# Altium schematic symbol library Diode.SchLib: 78 symbols
Pins are listed as number, name and electrical type; pins without a type are passive.

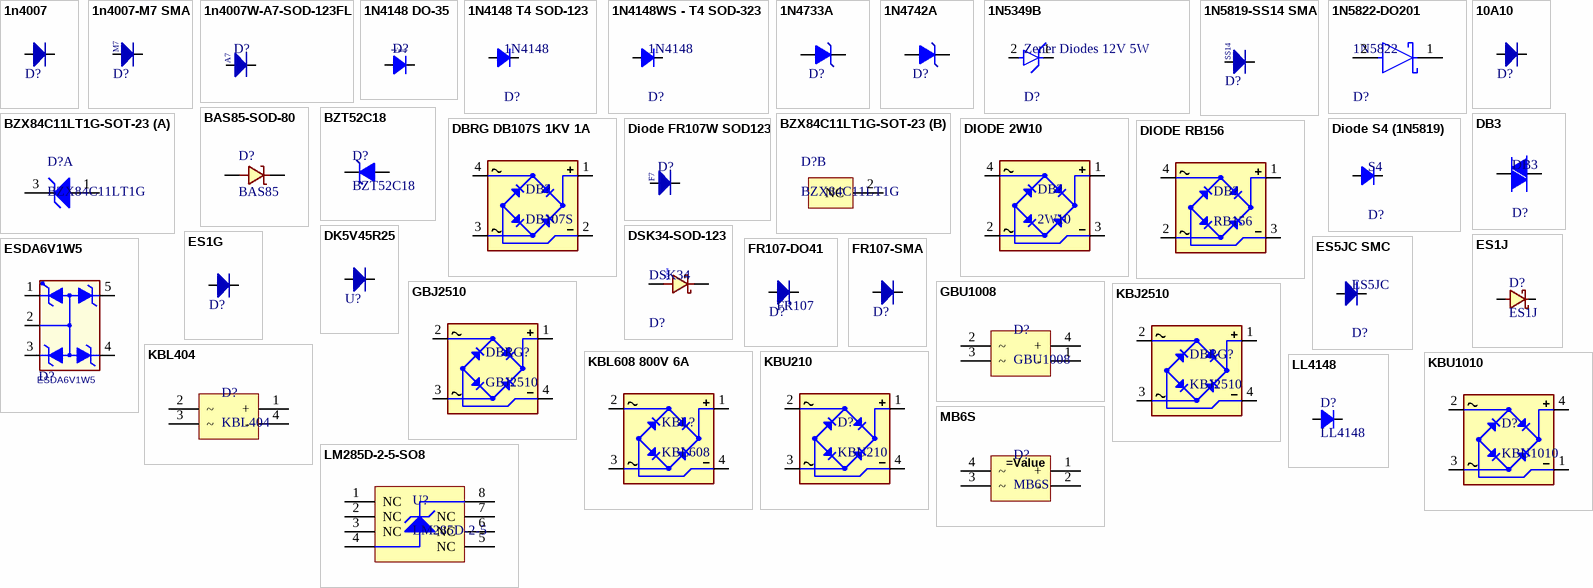
[diagram p0: symbols 1n4007 to MB6S]

## 1n4007
designator D?, comment 1N4007  (value not drawn)
DIODE GP 1A 1000V DO-204AL; Code: 2001-015; Designed by: Nhox
footprint D_AX04_DO41 (DIODE 0.4 INCH SPACING DO-41)
footprint D_AX03_1WS (DIODE 0.3 INCH SPACING 1W STAND)
pins: 1 A, 2 K

## 1n4007-M7 SMA
designator D?, comment 1N4007  (value not drawn)
Rectifier diode 1n4007 - SMA DO241AC; Code: 2001-013; Designed by: TranLuyen
footprint D_SMA (SMA Molded Diode, 2-Leads, Body 4.3x2.7mm, SOD-128)
pins: 1 A, 2 K
text: M7

## 1n4007W-A7-SOD-123FL
designator D?, comment 1N4007  (value not drawn)
Rectifier diode 1n4007-A7 SOD-123FL; Code: 2001-069; Designed by: TranLuyen
footprint DIODE_SOD123-FL (Molded Diode, 2-Leads, Body 4.3x2.7mm, SOD-128)
pins: A, K
text: A7

## 1N4148 DO-35
designator D?, comment 1N4148  (value not drawn)
0.15A, 75V, DO-35; Code: 2001-021; Designed by: Nhox
footprint D_AX03_DO35 (DIODE 0.3 INCH SPACING DO35)
pins: 1, 2

## 1N4148 T4 SOD-123
designator D?, comment 1N4148
1N4148 T4 SOD-123/1206; Code: 2001-025
footprint D_SOD123W (PowerDI-123, SOD123, DO-213AA, 1206D)
pins: 1, 2

## 1N4148WS - T4 SOD-323
designator D?, comment 1N4148
T4-Rectifier Diode Small Signal Switching 100V 0.25A 4ns 2-Pin SOD-323; Code: 2001-025
footprint D_SOD323 (DIODE0805, SOD-323, SC-76, DL-35, 0805 similar size)
pins: 1, 2

## 1N4733A
designator D?  (value not drawn)
Diode Zener 5.1V 1W; Code: 2003-048
footprint D_AX04_DO41 (DIODE 0.4 INCH SPACING DO-41)
footprint D_AX03_1WS (DIODE 0.3 INCH SPACING 1W STAND)
pins: 1 A, 2 K

## 1N4742A
designator D?  (value not drawn)
Diode Zener 12V 1W; Code: 2003-093
footprint D_AX04_DO41 (DIODE 0.4 INCH SPACING DO-41)
footprint D_AX03_1WS (DIODE 0.3 INCH SPACING 1W STAND)
pins: 1 A, 2 K

## 1N5349B
designator D?, comment Zener Diodes 12V 5W
Code: 2003-042
footprint TVS P6KE_MFG
pins: 1 C, 2 A

## 1N5819-SS14 SMA
designator D?, comment 1N5819  (value not drawn)
SS14 SMA Diode Schottky 1A 1N5819; Designed by: TranLuyen; Code: N/A
footprint D_SMA (SMA Molded Diode, 2-Leads, Body 4.3x2.7mm, SOD-128)
pins: 1 A, 2 K
text: SS14

## 1N5822-DO201
designator D?, comment 1N5822
LOW DROP POWER SCHOTTKY RECTIFIER 3A-DO201; Code: 2005-025
footprint DO-201AD_MFG STMicroelectronics
pins: 1 C, 2 A

## 10A10
designator D?  (value not drawn)
10A10 DIODE Schottky 10A 1kV; Code: N/A
footprint D_AX07_R-6 (DIODE 0.7 INCH SPACING, R-6)
pins: 1 A, 2 K

## BAS85-SOD-80
designator D?, comment BAS85
Schottky barrier single diode, 200mA, 30V; Code: 2003-145; Designed by: TranLuyen; ComponentLink1Description: Datasheet; ComponentLink1URL: https://www.vishay.com/docs/85510/bas85.pdf
footprint SOD80C_MFG
pins: 1 K, 2 A

## BZT52C18
designator D?
BZT52C18 SOD123 Diode Zener 18V 500mW
footprint D_SOD123W (PowerDI-123, SOD123, DO-213AA, 1206D)
pins: 1 A, 2 K

## BZX84C11LT1G-SOT-23
designator D?, comment BZX84C11LT1G
Y1-Zener diodes Voltage Regulator, 225 mW, 3-Pin SOT-23, Pb-Free, Tape and Reel; Designed by: TranLuyen; ComponentLink2Description: Datasheet; ComponentLink3Description: Package Specification; ComponentLink3URL: http://www.onsemi.cn/pub_link/Collateral/318-08.PDF; ComponentLink2URL: http://www.onsemi.com/pub_link/Collateral/BZX84C2V4LT1-D.PDF; Code: N/A
footprint SOT23_N NXP (SOT23, 3-Leads, Body 3x1.4mm, Pitch 0.95mm, IPC Medium Density)
part A pins: 1 A, 3 K
part B pins: 2 NC

## DB3
designator D?
Diac/Sidac Thyristor 28 ~ 36V 2A DO-35; Code: 1804-001
footprint D_AX03_DO35 (DIODE 0.3 INCH SPACING DO35)
pins: 1, 2

## DBRG DB107S 1KV 1A
designator DB?, comment DB107S
BRIDGE RECTIFIER 1KV 1A; Code: 2002-019; Designed by: TranLuyen
footprint DBRG_DIPSMD (BRIDGE RECTIFIER, pitch: 5.08mm, 8X6mm, DB-S, DF005S)
pins: 1 DCOUT+, 2 DCOUT-, 3 ACIN1, 4 ACIN2

## DIODE 2W10
designator DB?, comment 2W10
BRIDGE RECTIFIER 1KV 2A; Code: 2002-018
footprint DBRG_C10 (BRDIGE RECTIFIER, WOB WOG, pitch: 5.08mm, 10X10mm)
footprint DBRG_C10 - min (BRDIGE RECTIFIER, WOB WOG, pitch: 5.08mm, 10X10mm)
pins: 1 DCOUT+, 2 ACIN1, 3 DCOUT-, 4 ACIN2

## Diode FR107W SOD123
designator D?, comment FR107W  (value not drawn)
Diode FR107W SOD123; Code: 2001-072
footprint D1206 (SOD123, miniMELF, DO-213AA, MLL34, 320X160D)
pins: 1 A, 2 K
text: F7

## DIODE RB156
designator DB?, comment RB156
BRIDGE RECTIFIER 1KV 1.5A; Code: 2002-003
footprint DBRG_C10 (BRDIGE RECTIFIER, WOB WOG, pitch: 5.08mm, 10X10mm)
pins: 1 DCOUT+, 2 ACIN1, 3 DCOUT-, 4 ACIN2

## Diode S4 (1N5819)
designator D?, comment S4
Diode S4 SOD123 (1N5819 SOD123); Code: 2001-025
footprint D_SOD123W (PowerDI-123, SOD123, DO-213AA, 1206D)
pins: 1, 2

## DK5V45R25
designator U?  (value not drawn)
SM-7 Power Distribution Switches ROHS; Code: 5015-173
footprint SM-7
pins: 1 K, 2 A

## DSK34-SOD-123
designator D?, comment DSK34
Surface-Mount Schottky Barrier Rectifier; Code: 2001-086
footprint D_SOD123W (PowerDI-123, SOD123, DO-213AA, 1206D)
pins: 1 A, 2 K

## ES1G
designator D?  (value not drawn)
400V-1A Surface Mount Superfast Recovery Rectifier; Code: 2001-089; Designed by: TranLuyen
footprint D_SMA (SMA Molded Diode, 2-Leads, Body 4.3x2.7mm, SOD-128)
pins: 1 A, 2 K

## ES1J
designator D?
1A, 600V, SMA; Code: 2001-082; Designed by: Nhox
footprint D_SMA (SMA Molded Diode, 2-Leads, Body 4.3x2.7mm, SOD-128)
pins: 1 A, 2 K

## ES5JC SMC
designator D?, comment ES5JC
Surface Mount Superfast Recovery Rectifier 5A 600V; Designed by: TranLuyen; Code: N/A
footprint D_SMC (SMC, Molded Diode, 7.0x6.0mm)
pins: 1 A, 2 K

## ESDA6V1W5
designator D?
Code: 2006-021
footprint ST_SOT323-5L
pins: 1, 2, 3, 4, 5

## FR107-DO41
designator D?, comment FR107
Fast Recovery Axial Rectifiers; Designed by: TranLuyen; Code: N/A
footprint D_AX04_DO41 (DIODE 0.4 INCH SPACING DO-41)
pins: 1 A, 2 K

## FR107-SMA
designator D?, comment FR107  (value not drawn)
Designed by: TranLuyen; Code: N/A
footprint D_SMA (SMA Molded Diode, 2-Leads, Body 4.3x2.7mm, SOD-128)
pins: 1 A, 2 K

## GBJ2510
designator DBRG?
1000V 25A; Code: 2002-001
footprint GBJ
pins: 1 DCOUT+, 2 ACIN2, 3 ACIN1, 4 DCOUT-

## GBU1008
designator D?
VR = 800V, VR(rms) = 560V, I = 10A, Ifsm = 220A, VFM 1.0V; Code: N/A
footprint DBRG_23X7 (BRDIGE RECTIFIER, KBU 810 pitch: 5.08mm, 23X7X19mm)
pins: 1 -, 2 ~, 3 ~, 4 +

## KBJ2510
designator DBRG?
1000V 25A; Code: N/A
footprint KBJ25xx (30*4.8*19.7mm)
pins: 1 DCOUT+, 2 ACIN2, 3 ACIN1, 4 DCOUT-

## KBL404
designator D?
400V 4A; Code: 2002-035; Designed by: nhox
footprint KBL404
pins: 1 +, 2 ~, 3 ~, 4 -

## KBL608 800V 6A
designator KBL?, comment KBL608
BRIDGE RECTIFIER 800V 6A
footprint KBL404
pins: 1 DCOUT+, 2 ACIN2, 3 ACIN1, 4 DCOUT-

## KBU210
designator D?
2A 1000V; Code: 2002-031
footprint KBU210 (4-SIP, KBPR)
pins: 1 DCOUT+, 2 ACIN2, 3 ACIN1, 4 DCOUT-

## KBU1010
designator D?
1000V 10A; Code: 2002-033
footprint KBU10xx (22.7x19.8x6.6mm)
pins: 1 DCOUT-, 2 ACIN2, 3 ACIN1, 4 DCOUT+

## LL4148
designator D?
0.2A, 100V, SOD80; Code: 2001-012; Designed by: Nhox
footprint SOD80C_MFG
footprint SOD80C_SMT
pins: 1, 2

## LM285D-2-5-SO8
designator U?, comment LM285D-2-5
Micropower Voltage Reference, 2.5 V, 20 ppm / degC, 20 mA, -40 to 85 degC, 8-pin SOIC (D), Green (RoHS & no Sb/Br); Designed by: TranLuyen; ComponentLink2Description: Datasheet; ComponentLink2URL: http://www.ti.com/general/docs/lit/getliterature.tsp?genericPartNumber=LM285-2.5&fileType=pdf; Code: N/A
footprint SO_8 (SOP-8, 5x3.9mm body 1.27mm pitch, SOT96-1, M08A, S8, SOIC8, VO8, MS-012AA(JEDEC), R-8, 8S2, VOG8)
pins: 1 NC "No internal connection", 2 NC "No internal connection", 3 NC "No internal connection", 4 ANODE, 5 NC "No internal connection", 6 NC "No internal connection", 7 NC "No internal connection", 8 CATHODE

## MB6S
designator D?
1 pha, 0.5A, 600V, Reel; Code: 2002-007
footprint DBRG_DIPSMD_MINI (MDB, MBS, TO-269AA, pitch:2.54mm, 4.8x3.8mm)
pins: 1 +, 2 -, 3 ~, 4 ~

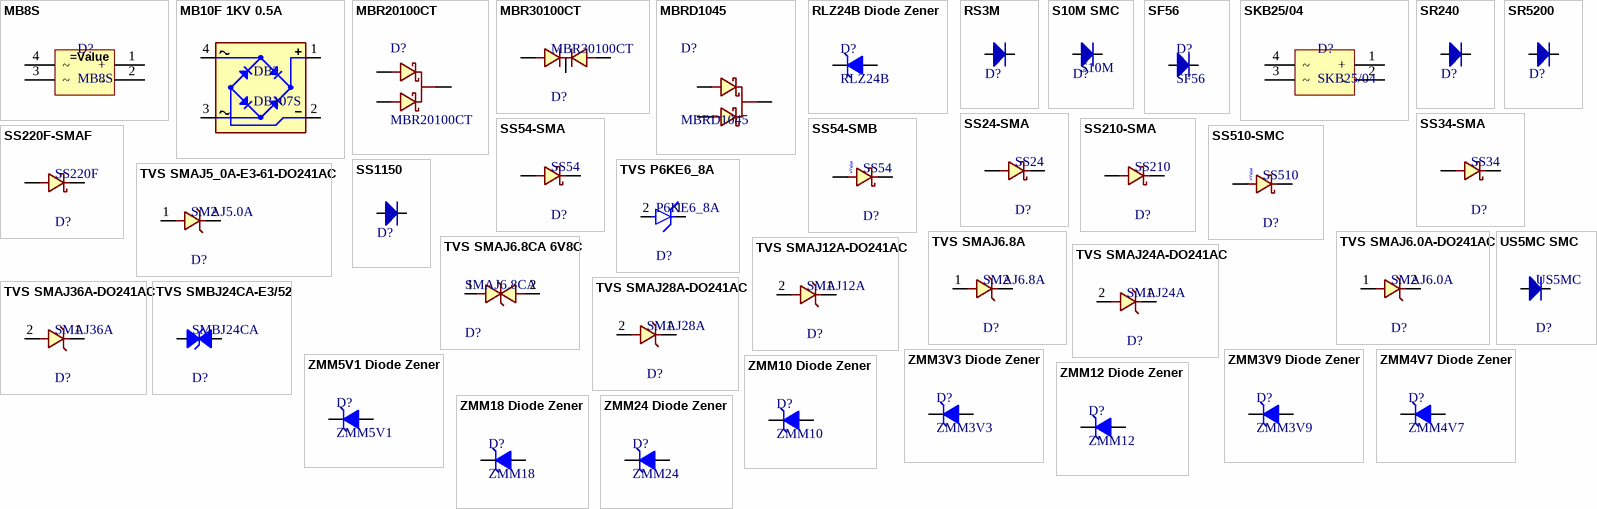
[diagram p1: symbols MB8S to ZMM24 Diode Zener]

## MB8S
designator D?
0.5A, 800V, 4 Pin / Bridge Rectifiers, 0.5 A; Code: 2002-006; Designed by: nhox
footprint DBRG_DIPSMD_MINI (MDB, MBS, TO-269AA, pitch:2.54mm, 4.8x3.8mm)
pins: 1 +, 2 -, 3 ~, 4 ~

## MB10F 1KV 0.5A
designator DB?, comment DB107S
BRIDGE RECTIFIER 1KV 1A; Code: 2002-019; Designed by: TranLuyen
footprint DBRG_DIPSMD_MINI (MDB, MBS, TO-269AA, pitch:2.54mm, 4.8x3.8mm)
pins: 1 DCOUT+, 2 DCOUT-, 3 ACIN1, 4 ACIN2

## MBR20100CT
designator D?
MBR20100CT Diode Schottky 100V 10A TO-220; Code: N/A
footprint QTO-220- DIODE (TO-220 - 1-2-3)
pins: 1 A1, 2 K, 3 A2

## MBR30100CT
designator D?
Diode Array Schottky 100V 30A TO-220; Code: 2003-150
footprint QTO-220 25x24x16 (TO-220 25x24x16)
footprint QTO-220 (TO-220 - 1-2-3)
footprint QTO-220H3 (TO-220 1-2-3)
pins: 1 A1, 2 K, 3 A2

## MBRD1045
designator D?
10 AMP SCHOTTKY DIODE BARRIER RECTIFIERS; Designed by: TranLuyen; Code: N/A
footprint TO-252 (KVU D-PAK, 3-Pads, Body 6,2x6,7mm (max), IPC Medium Density)
pins: 1 A1, 2 K, 3 A2

## RLZ24B Diode Zener
designator D?, comment RLZ24B
zener 22.61-23.77V 500mW SMD; Code: 2003-029
footprint SOD80C_MFG
pins: 1 K, 2 A

## RS3M
designator D?  (value not drawn)
3.0A SURFACE MOUNT FAST RECOVERY RECTIFIER; Code: 2005-035; Designed by: Nhox
footprint D_SMB (SMB Molded Diode, 2-Leads, Body 4.3x3.5mm)
pins: 1 A, 2 K

## S10M SMC
designator D?, comment S10M
Rectifier diode SMC 10A10 10A 1KV; Designed by: TranLuyen; Code: N/A
footprint D_SMC (SMC, Molded Diode, 7.0x6.0mm)
pins: 1 A, 2 K

## SF56
designator D?
Diode SF56 5A 400V; Code: 2002-027
footprint DO-201AD_MFG STMicroelectronics
pins: 1 K, 2 A

## SKB25/04
designator D?
400V Max 17A; Code: 2002-036; Designed by: nhox
footprint SKB25
pins: 1 +, 2 -, 3 ~, 4 ~

## SR240
designator D?  (value not drawn)
SR240 Diode Schottky 2A 40V; Code: N/A
footprint D_AX04_DO41 (DIODE 0.4 INCH SPACING DO-41)
pins: 1 A, 2 K

## SR5200
designator D?  (value not drawn)
Diode SR5200 DIP DO-27 5A 200V Diode Schottky
footprint D_AX06_DO27 (DIODE 0.6 INCH SPACING A-500 (Vishay)  DO-201A DO-27 BYW98)
pins: 1 A, 2 K

## SS24-SMA
designator D?, comment SS24
Diode Schottky 2A SS24 DO-241; Code: 2005-023
footprint D_SMA (SMA Molded Diode, 2-Leads, Body 4.3x2.7mm, SOD-128)
pins: 1 A, 2 K

## SS34-SMA
designator D?, comment SS34
Surface-Mount Schottky Barrier Rectifier; Code: 2005-008
footprint D_SMA (SMA Molded Diode, 2-Leads, Body 4.3x2.7mm, SOD-128)
pins: 1 A, 2 K

## SS54-SMA
designator D?, comment SS54
Surface-Mount Schottky Barrier Rectifier; Code: 2003-152
footprint D_SMA (SMA Molded Diode, 2-Leads, Body 4.3x2.7mm, SOD-128)
pins: 1 A, 2 K

## SS54-SMB
designator D?, comment SS54
Surface-Mount Schottky Barrier Rectifier; Code: 2005-005
footprint D_SMB (SMB Molded Diode, 2-Leads, Body 4.3x3.5mm)
pins: 1 A, 2 K

## SS210-SMA
designator D?, comment SS210
Surface-Mount Schottky Barrier Rectifier; Code: 2005-026
footprint D_SMA (SMA Molded Diode, 2-Leads, Body 4.3x2.7mm, SOD-128)
pins: 1 A, 2 K

## SS220F-SMAF
designator D?, comment SS220F
200V Independent Type 950mV@2A 2A SMAF Schottky Diodes ROHS; Code: N/A
footprint D_SMA (SMA Molded Diode, 2-Leads, Body 4.3x2.7mm, SOD-128)
pins: 1 A, 2 K

## SS510-SMC
designator D?, comment SS510
SMT Schottky Diode, 100V 5A, 2-Pin DO-214AB (SMC); Code: N/A
footprint D_SMC (SMC, Molded Diode, 7.0x6.0mm)
pins: 1 A, 2 K

## SS1150
designator D?  (value not drawn)
SURFACE MOUNT SCHOTTKY BARRIER RECTIFIER
footprint D_SOD123W (PowerDI-123, SOD123, DO-213AA, 1206D)
pins: 1 A, 2 K

## TVS P6KE6_8A
designator D?, comment P6KE6_8A
Littelfuse P6KE6.8A DO-204AC (DO-15); Code: 2006-005
footprint TVS P6KE_MFG
pins: 1 C, 2 A

## TVS SMAJ5_0A-E3-61-DO241AC
designator D?, comment SMAJ5.0A
SMAJ5.0A Series 400 W 5 V Surface Mount Uni-Directional TVS Diode - DO-214AC; Code: 2006-010; Designed by: TranLuyen; ComponentLink1Description: Datasheet; ComponentLink1URL: https://datasheet.octopart.com/SMAJ5.0AHE3-61-Vishay-datasheet-15599035.pdf
footprint D_SMA (SMA Molded Diode, 2-Leads, Body 4.3x2.7mm, SOD-128)
pins: 1, 2

## TVS SMAJ6.0A-DO241AC
designator D?, comment SMAJ6.0A
TVS Diodes Surface Mount – 400W > SMAJ series; Code: 2006-028; Designed by: TranLuyen
footprint D_SMA (SMA Molded Diode, 2-Leads, Body 4.3x2.7mm, SOD-128)
pins: 1, 2

## TVS SMAJ6.8A
designator D?, comment SMAJ6.8A
SMAJ6.8A DO-214AC (SMA); Code: 2006-018
footprint D_SMA (SMA Molded Diode, 2-Leads, Body 4.3x2.7mm, SOD-128)
pins: 1 2, 2 1

## TVS SMAJ6.8CA 6V8C
designator D?, comment SMAJ6.8CA
SMAJ6.8CA 6V8C DO-214AC (SMA); Code: 2006-018
footprint DO_241AC_SMA bi-directional
pins: 1, 2

## TVS SMAJ12A-DO241AC
designator D?, comment SMAJ12A
SMAJ12A Series 400 W 12 V Surface Mount Uni-Directional TVS Diode - DO-214AC; Code: 2006-023; Designed by: TranLuyen
footprint DO_241AC_SMA_MFG
pins: 1, 2

## TVS SMAJ24A-DO241AC
designator D?, comment SMAJ24A
SMAJ Series 400W Surface Mount Uni-Directional TVS Diode - DO-214AC; Designed by: TranLuyen; Code: N/A
footprint DO_241AC_SMA_MFG
pins: 1, 2

## TVS SMAJ28A-DO241AC
designator D?, comment SMAJ28A
SMAJ Series 400W Surface Mount Uni-Directional TVS Diode - DO-214AC; Code: 2006-031; Designed by: TranLuyen
footprint DO_241AC_SMA_MFG
pins: 1, 2

## TVS SMAJ36A-DO241AC
designator D?, comment SMAJ36A
SMAJ Series 400W Surface Mount Uni-Directional TVS Diode - DO-214AC; Code: 2006-004
footprint DO_241AC_SMA_MFG
pins: 1, 2

## TVS SMBJ24CA-E3/52
designator D?, comment SMBJ24CA
TVS Diodes Surface Mount – 600W > SMBJ series; Code: 2006-019; Designed by: TranLuyen; ComponentLink1Description: Datasheet; ComponentLink1URL: https://github.com/TranLuyen-dev/Datasheets/blob/a1d68ec5916dc788473de64f4e2da5776c4a4616/Diode/TVS_Diode_SMBJ.pdf
footprint D_SMB (SMB Molded Diode, 2-Leads, Body 4.3x3.5mm)
pins: 1, 2

## US5MC SMC
designator D?, comment US5MC
Surface Mount Ultra Fast Rectifiers 1KV 5A; Designed by: TranLuyen; Code: N/A; LCSC Part: C3011139
footprint D_SMC (SMC, Molded Diode, 7.0x6.0mm)
pins: 1 A, 2 K

## ZMM3V3 Diode Zener
designator D?, comment ZMM3V3
zener 3.3V 500mW SMD; Code: 2003-011; Designed by: Nhox
footprint SOD80C_MFG
footprint SOD80C_SMT
pins: 1 K, 2 A

## ZMM3V9 Diode Zener
designator D?, comment ZMM3V9
ZMM3V9 Diode Zener 3.9V 500mW SMD; Code: 2003-013
footprint SOD80C_MFG
pins: 1 K, 2 A

## ZMM4V7 Diode Zener
designator D?, comment ZMM4V7
zener 4.7V 500mW SMD; Code: 2003-015; Designed by: Nhox
footprint SOD80C_MFG
footprint SOD80C_SMT
pins: 1 K, 2 A

## ZMM5V1 Diode Zener
designator D?, comment ZMM5V1
zener 5.1V 500mW SMD; Code: 2003-118
footprint SOD80C_MFG
pins: 1 K, 2 A

## ZMM10 Diode Zener
designator D?, comment ZMM10
ZMM10 Diode Zener 10V 500mW SMD; Code: 2003-137
footprint SOD80C_MFG
pins: 1 K, 2 A

## ZMM12 Diode Zener
designator D?, comment ZMM12
zener 500mW SMD; Code: 2003-023; Designed by: TranLuyen
footprint SOD80C_MFG
footprint SOD80C_SMT
pins: 1 K, 2 A

## ZMM18 Diode Zener
designator D?, comment ZMM18
zener 18V 500mW SMD; Code: 2003-025
footprint SOD80C_MFG
pins: 1 K, 2 A

## ZMM24 Diode Zener
designator D?, comment ZMM24
zener 24V 500mW SMD; Code: N/A
footprint SOD80C_MFG
pins: 1 K, 2 A